# Altium footprint library WMK36N65C4.PcbLib: 1 footprints
Each footprint in its own frame and in the unit in brackets; x right, y up, seen from the top. Pads: shape width x height; smd on the part's side, far side on the other; paste and mask are expansions set on the pad; w line width, h text height; cw(c..) or ccw(c..) is an arc to the next point about the centre after c.
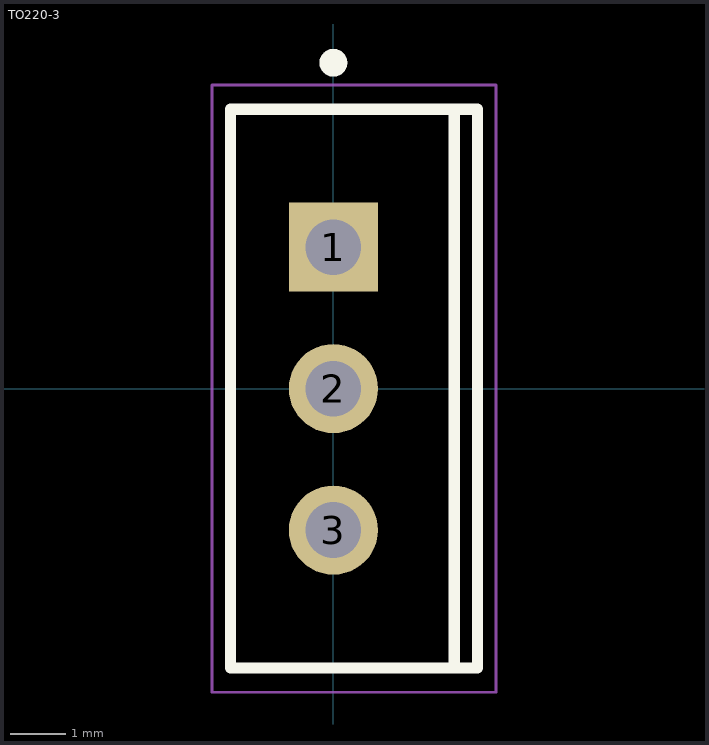
[diagram p0: the footprint, top view; thin cyan lines are the x and y axes]

## TO220-3 [mm] "TO220-3-Leads, Body 10.03 X 4.435mm,Pitch 2.54mm"
height 20.75
pads (3):
  rect 1.6x1.6 hole 1 paste-2539.97 mask+0: 1(0,2.54)
  round 1.6 hole 1 paste-2539.97 mask+0: 2(0,0) 3(0,-2.54)
Top Overlay:
  circle w0.25: c0,5.85 r0.125
  lines w0.2: 2.17,-5 2.17,5 ; -1.847,-5.015 -1.847,5.015 2.588,5.015 2.588,-5.015 -1.847,-5.015
  text ".DESIGNATOR" at 0.486,5.568 h1
Mechanical 13:
  lines w0.1: 2.588,5.015 2.588,-5.015 -1.847,-5.015 -1.847,5.015 2.588,5.015
Mechanical 15:
  lines w0.05: -2.18,-5.45 2.92,-5.45 2.92,5.45 -2.18,5.45 -2.18,-5.45
  lines w0.1: -0.5,0 0.5,0 ; 0,-0.5 0,0.5
3D body "TO220-3-111.stp": height 19.6, standoff -10, extent -2.04,-5.25 2.82,5.25